# Altium footprint library SamacSys.PcbLib: 3 footprints
Each footprint in its own frame and in the unit in brackets; x right, y up, seen from the top. Pads: shape width x height; smd on the part's side, far side on the other; paste and mask are expansions set on the pad; w line width, h text height; cw(c..) or ccw(c..) is an arc to the next point about the centre after c.
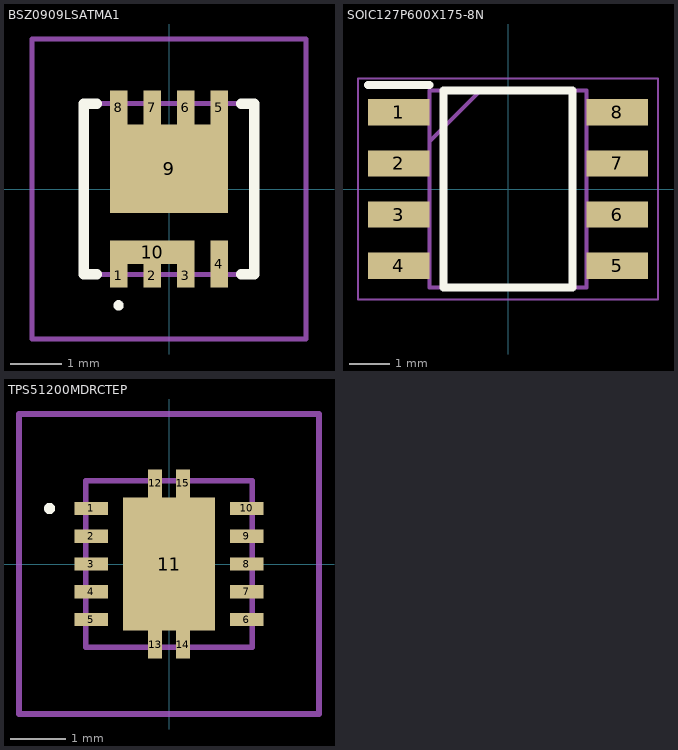
[diagram p0: the footprints below, top view; thin cyan lines are the x and y axes]

## BSZ0909LSATMA1 [mm]
pads (10):
  rect 0.34x0.45 smd: 1(-0.975,-1.675) 2(-0.325,-1.675) 3(0.325,-1.675)
  rect 0.34x0.9 smd: 4(0.975,-1.45)
  rect 0.34x0.65 smd: 5(0.975,1.575) 6(0.325,1.575) 7(-0.325,1.575) 8(-0.975,1.575)
  rect 2.29x1.71 smd: 9(0,0.395)
  rect 1.635x0.45 smd: 10(-0.325,-1.225)
Top Overlay:
  lines w0.1: -0.975,-2.3 ccw(c-0.975,-2.25) -0.975,-2.2 ccw(c-0.975,-2.25) -0.975,-2.3
  lines w0.2: -1.4,-1.65 -1.65,-1.65 -1.65,1.65 -1.4,1.65 ; 1.4,-1.65 1.65,-1.65 1.65,1.65 1.4,1.65
Mechanical 13:
  lines w0.1: -1.65,-1.65 -1.65,1.65 1.65,1.65 1.65,-1.65 -1.65,-1.65
Mechanical 15:
  lines w0.1: -2.65,-2.9 -2.65,2.9 2.65,2.9 2.65,-2.9 -2.65,-2.9
3D body "BSZ075N08NS5ATMA1.stp": height 1.1, standoff 0, extent -1.7,-1.7 1.7,1.7

## SOIC127P600X175-8N [mm]
pads (8):
  rect 1.525x0.65 smd: 1(-2.712,1.905) 2(-2.712,0.635) 3(-2.712,-0.635) 4(-2.712,-1.905) 5(2.712,-1.905) 6(2.712,-0.635) 7(2.712,0.635) 8(2.712,1.905)
Top Overlay:
  lines w0.2: -3.475,2.58 -1.95,2.58 ; -1.6,-2.45 1.6,-2.45 1.6,2.45 -1.6,2.45 -1.6,-2.45
Mechanical 13:
  lines w0.1: -1.95,1.18 -0.68,2.45 ; -1.95,-2.45 1.95,-2.45 1.95,2.45 -1.95,2.45 -1.95,-2.45
Mechanical 15:
  lines w0.05: -3.725,-2.75 3.725,-2.75 3.725,2.75 -3.725,2.75 -3.725,-2.75
3D body "NE555DR.stp": height 1.75, standoff 0, extent -3,-2.45 3,2.45

## TPS51200MDRCTEP [mm]
pads (15):
  rect 0.6x0.24 smd: 1(-1.4,1) 2(-1.4,0.5) 3(-1.4,0) 4(-1.4,-0.5) 5(-1.4,-1) 6(1.4,-1) 7(1.4,-0.5) 8(1.4,0) 9(1.4,0.5) 10(1.4,1)
  rect 1.65x2.4 smd: 11(0,0)
  rect 0.25x0.5 smd: 12(-0.25,1.45) 13(-0.25,-1.45) 14(0.25,-1.45) 15(0.25,1.45)
Top Overlay:
  lines w0.1: -2.2,1 cw(c-2.15,1) -2.1,1 cw(c-2.15,1) -2.2,1
Mechanical 13:
  lines w0.1: -1.5,-1.5 -1.5,1.5 1.5,1.5 1.5,-1.5 -1.5,-1.5
Mechanical 15:
  lines w0.1: -2.7,-2.7 -2.7,2.7 2.7,2.7 2.7,-2.7 -2.7,-2.7
3D body "UCC27289DRCR.stp": height 1, standoff 0, extent -1.5,-1.5 1.5,1.5